# Altium footprint library AS150UPW_2+4_M_G_Y.PcbLib: 1 footprints
Each footprint in its own frame and in the unit in brackets; x right, y up, seen from the top. Pads: shape width x height; smd on the part's side, far side on the other; paste and mask are expansions set on the pad; w line width, h text height; cw(c..) or ccw(c..) is an arc to the next point about the centre after c.
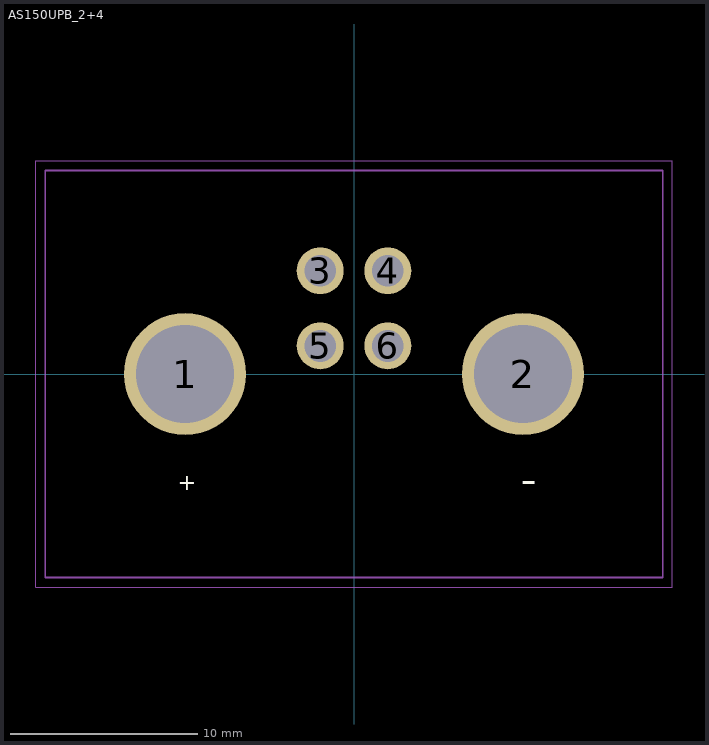
[diagram p0: the footprint, top view; thin cyan lines are the x and y axes]

## AS150UPB_2+4 [mm]
pads (6):
  round 6.5 hole 5.2: 1(-9,0) 2(9,0)
  round 2.5 hole 1.7: 3(-1.8,5.5) 4(1.8,5.5) 5(-1.8,1.5) 6(1.8,1.5)
F.SilkS:
  text "+" at -9.398,-6.477 h1.5
  text "-" at 8.89,-6.985 h3
F.CrtYd:
  lines w0.05: -16.95,-11.35 16.95,-11.35 16.95,11.35 -16.95,11.35 -16.95,-11.35
F.Fab:
  lines w0.1: -16.45,-10.85 16.45,-10.85 16.45,10.85 -16.45,10.85 -16.45,-10.85
  text "Power Connector" at -2.032,-2.921 h1